# Altium schematic symbol library Lab.SchLib: 4 symbols
Pins are listed as number, name and electrical type; pins without a type are passive.

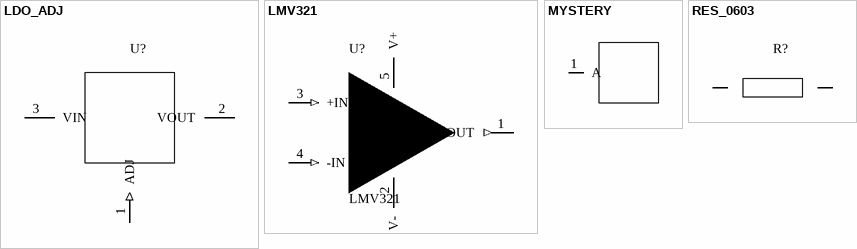
[diagram p0: symbols LDO_ADJ to RES_0603]

## LDO_ADJ
designator U?
Adjustable LDO
footprint SOT223
pins: 1 ADJ (in), 2 VOUT (power), 3 VIN (power)

## LMV321
designator U?
Single op-amp, rail to rail output; Manufacturer: Texas Instruments
footprint SOT23-5
pins: 1 OUT (out), 2 V- (power), 3 +IN (in), 4 -IN (in), 5 V+ (power)

## MYSTERY
designator ?
Footprint in no selected library
footprint QFN99
pins: 1 A

## RES_0603
designator R?
Resistor
footprint R0603
pins: 1, 2